# Altium schematic symbol library 电容220µF_Panasonic EEU-FR1J221.SCHLIB: 1 symbol
Pins are listed as number, name and electrical type; pins without a type are passive.

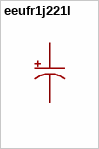
[diagram p0: symbol eeufr1j221l]

## eeufr1j221l
designator C??  (value not drawn)
容值:220uF;精度:±20%;额定电压:63V;纹波电流:1.5A@100kHz;等效串联电阻(ESR):33mΩ@100kHz;; Manufacturer: PANASONIC(松下); AddInBom: yes; ModelId: 6ce78ce5315348e095d700085da75e48; ModelName: CAP-TH_D10.0-H16.0-P5.00; ModelTransform: 394.094,393.72252,0,0,0,0,0,0,-137.795; Value: 220uF; Tolerance: ±20%; Voltage Rating: 63V; Pin Spacing: 5mm; Lifetime: 10000hrs@105℃; Symbol: EEUFR1J221L; LCSC Part Name: 220uF ±20% 63V; SupplierPart: C178712; ManufacturerPart: EEUFR1J221L; Supplier Footprint: 插件,D10xL25mm; JLCPCB Part Class: Extended Part; Datasheet: https://item.szlcsc.com/datasheet/EEUFR1J221L/190105.html; Supplier: LCSC; ConvertToPcb: yes; FootprintName: CAP-TH_BD10.0-P5.00-D1.0-FD; Ripple Current: 1.5A@100kHz; Equivalent Series Resistance(ESR): 33mΩ@100kHz; Diameter: 10mm; Height - Seated (Max): 25mm; Operating Temperature: -40℃~+105℃
footprint CAP-TH_BD10.0-P5.00-D1.0-FD
pins: 1, 2